# Altium schematic symbol library Schlib1.SchLib: 63 symbols (part 3 of 3)
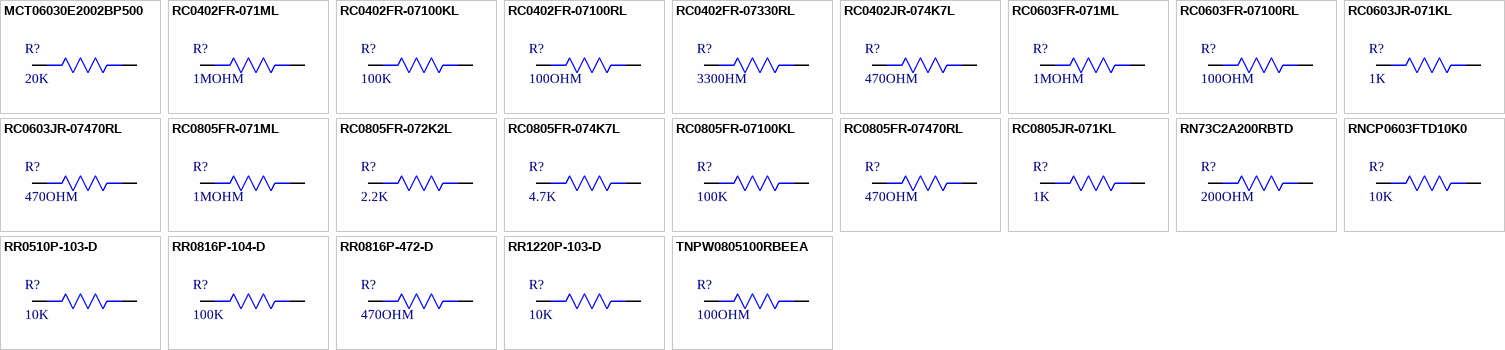
[diagram p3: symbols MCT06030E2002BP500 to TNPW0805100RBEEA]

## RR1220P-103-D
designator R?, comment 10K
RES SMD 10K OHM 0.5% 1/10W 0805; Manufacturer: Susumu; Manufacturer Part Number: RR1220P-103-D; Description: SUSUMU - RR1220P-103-D - SMD Chip Resistor, 0805 [2012 Metric], 10 kohm, RR Series, 100 V, Thin Film, 100 mW; Resistance: 10kR; Power Rating: 100mW; Voltage Rating: 100V; Temperature Coefficient: 25ppm/°C; Supplier 1: Digi-Key; Stock 1: 427229; Pricing 1: 1=0.11, 10=0.098, 100=0.0376, 1000=0.01654, 2500=0.01428 (USD); Case/Package: 0805; Weight: 0.000194oz; Case Code (Imperial): 0805; Case Code (Metric): 2012; Min Operating Temperature: -55°C; Max Operating Temperature: 125°C; Packaging: Tape and Reel; Tolerance: 0.5%; Package Quantity: 1; Termination: SMD/SMT; Composition: Thin Film; Number of Terminations: 2; Max Power Dissipation: 100mW; Voltage Rating (DC): 100V; Length: 2mm; Height: 0.4mm; Width: 1.25mm; Depth: 1.25mm; REACH SVHC: Unknown; Lead Free: Lead Free; ComponentLink1URL: http://www.susumu.co.jp/common/pdf/n_catalog_partition05_en.pdf?src-supplier=Digi-Key; ComponentLink1Description: http://www.susumu.co.jp/common/pdf/n_catalog_partition05_en.pdf?src-supplier=Digi-Key; ComponentLink2URL: http://documents.rs-components.com/techlib://itc_doclist_GB.htm?stockno=3915630&src-supplier=RSComponents; ComponentLink2Description: http://documents.rs-components.com/techlib://itc_doclist_GB.htm?stockno=3915630&src-supplier=RSComponents; ComponentLink3URL: http://www.farnell.com/datasheets/2243860.pdf?src-supplier=Element14; ComponentLink3Description: http://www.farnell.com/datasheets/2243860.pdf?src-supplier=Element14; Supplier Part Number 1: RR12P10.0KDCT-ND
footprint Resistor0805 (SMD 0805)
pins: 1, 2

## TNPW0805100RBEEA
designator R?, comment 100OHM
RES 100 OHM 0.1% 1/8W 0805; Manufacturer: Vishay Dale; Manufacturer Part Number: TNPW0805100RBEEA; Description: RES 100 OHM 0.1% 1/5W 0805; Voltage Rating: 150V; Resistance: 100R; Power Rating: 125mW; Temperature Coefficient: 25ppm/°C; Voltage Rating (DC): 100V; Supplier 1: Farnell; Stock 1: 10000; Pricing 1: 5000=0.184 (GBP); Case/Package: 0805; Weight: 0.000194oz; Case Code (Imperial): 0805; Case Code (Metric): 2012; Contact Plating: Tin; Min Operating Temperature: -55°C; Max Operating Temperature: 125°C; Packaging: Tape and Reel; Termination: SMD/SMT; Composition: Thin Film; Military Standard: Not; Working Voltage: 150V; Number of Terminations: 2; Length: 2mm; Height: 0.45mm; Width: 1.2mm; Depth: 1.25mm; Radiation Hardening: No; REACH SVHC: No SVHC; Lead Free: Lead Free; ComponentLink1URL: https://www.alliedelec.com/m/d/50d2ac1c48d1d3072c857498c4cadcee.pdf?src-supplier=Allied+Electronics; ComponentLink1Description: https://www.alliedelec.com/m/d/50d2ac1c48d1d3072c857498c4cadcee.pdf?src-supplier=Allied+Electronics; ComponentLink2URL: http://www.vishay.com/docs/28758/tnpw_e3.pdf?src-supplier=Avnet; ComponentLink2Description: http://www.vishay.com/docs/28758/tnpw_e3.pdf?src-supplier=Avnet; ComponentLink3URL: http://www.farnell.com/datasheets/2049119.pdf?src-supplier=Element14; ComponentLink3Description: http://www.farnell.com/datasheets/2049119.pdf?src-supplier=Element14; Supplier Part Number 1: 2411808
footprint Resistor0805 (SMD 0805)
pins: 1, 2